# Altium footprint library Amin-Library.PcbLib: 601 footprints (part 36 of 38)
Each footprint in its own frame and in the unit in brackets; x right, y up, seen from the top. Pads: shape width x height; smd on the part's side, far side on the other; paste and mask are expansions set on the pad; w line width, h text height; cw(c..) or ccw(c..) is an arc to the next point about the centre after c.
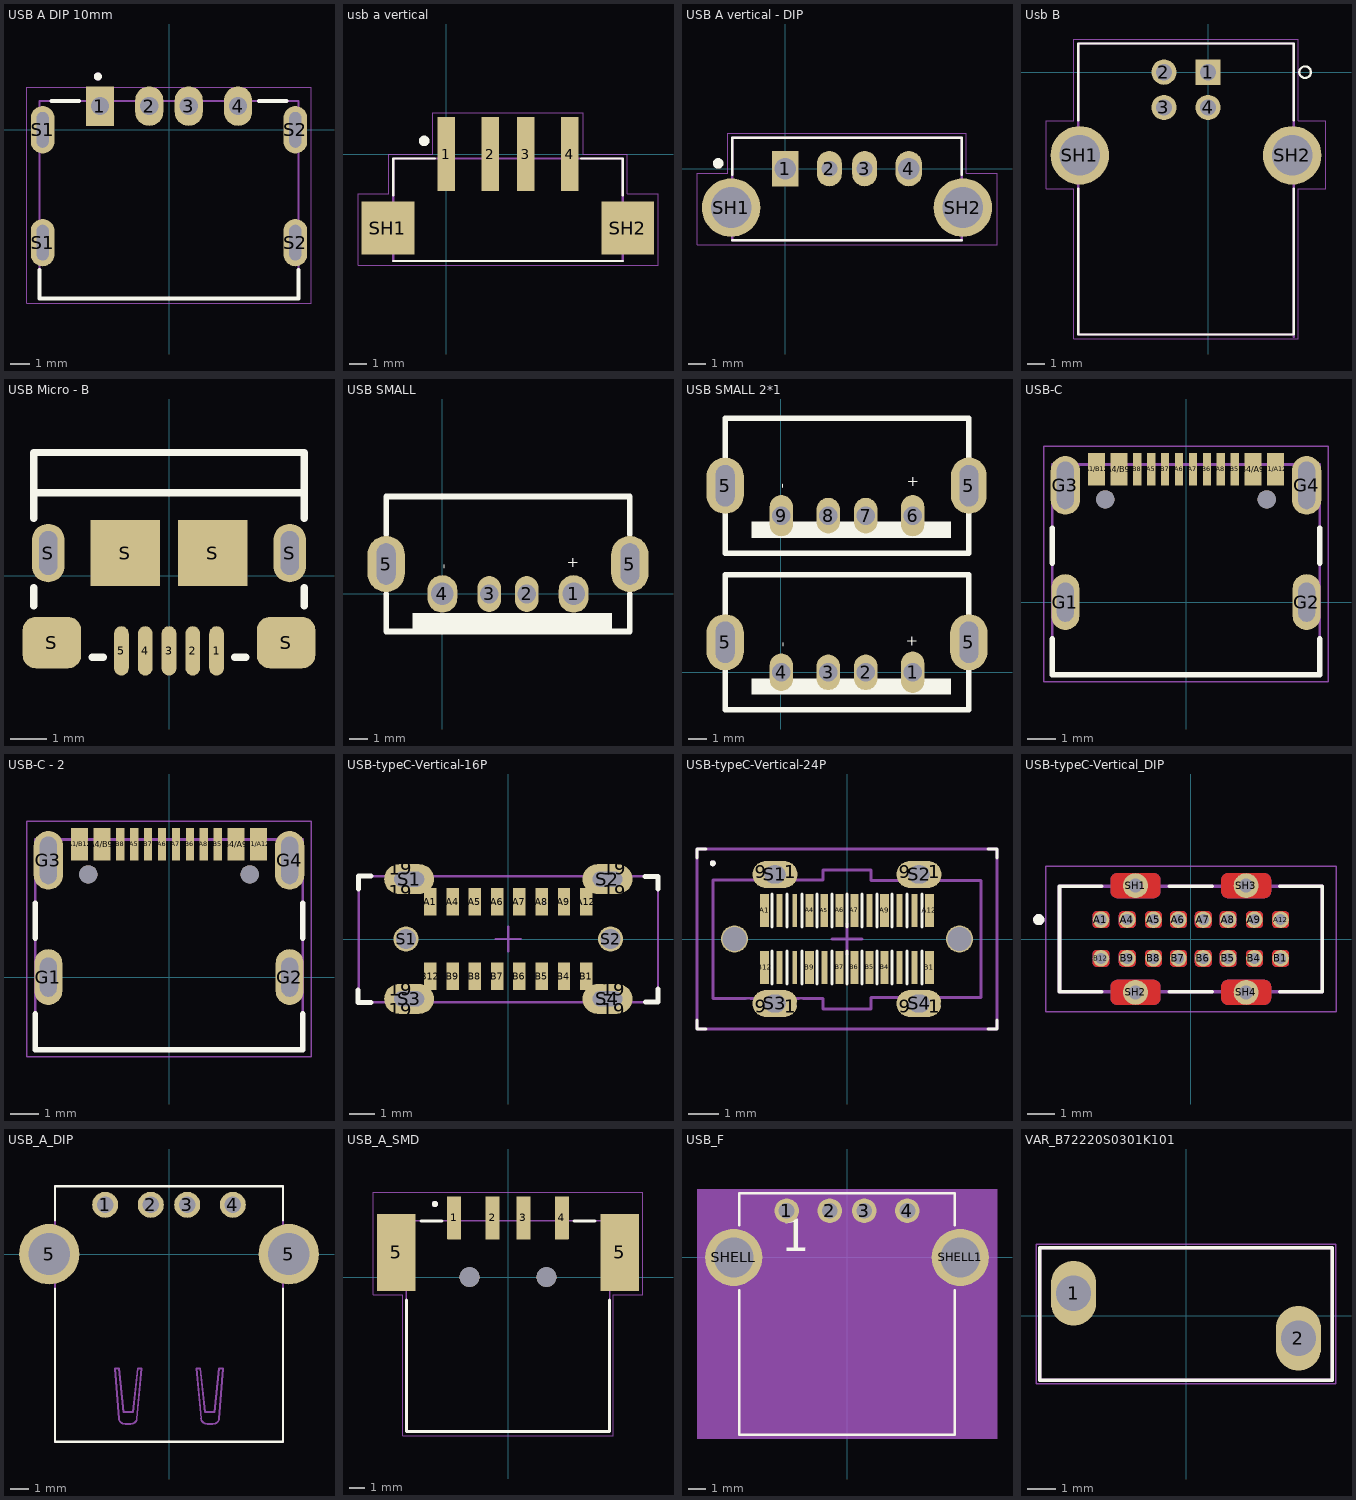
[diagram p35: the footprints below, top view; thin cyan lines are the x and y axes]

## USB A DIP 10mm [mm]
height 6.63
pads (8):
  rect 1.428x2 hole 0.92: 1(-3.5,1.2)
  oval 1.428x2 hole 0.92: 2(-1,1.2) 3(1,1.2) 4(3.5,1.2)
  oval 1.2x2.4 hole 0.6 slot 1.8 at 90 deg: S1(-6.4,-5.715) S1(-6.4,0) S2(6.4,-5.715) S2(6.4,0)
Top Overlay:
  circle w0.2: c-3.6,2.7 r0.1
  lines w0.2: -6.55,-7.112 -6.55,-8.55 6.55,-8.55 6.55,-7.112 ; -5.95,1.45 -4.55,1.45 ; 4.55,1.45 5.95,1.45
Mechanical 13:
  circle w0.2: c-3.6,2.7 r0.1
  lines w0.1: -6.55,-8.55 -6.55,1.45 6.55,1.45 6.55,-8.55 -6.55,-8.55
Mechanical 15:
  lines w0.05: -7.205,-8.8 -7.205,2.165 7.205,2.165 7.205,-8.8 -7.205,-8.8
3D body "usb1125-gf-b.stp": height 5.86, standoff -3.15, extent -6.55,-8.646 6.55,1.354

## usb a vertical [mm]
pads (6):
  rect 1x4.2 smd: 1(0,0) 2(2.5,0) 3(4.5,0) 4(7,0)
  rect 3x3 smd: SH1(-3.302,-4.191) SH2(10.287,-4.191)
Top Overlay:
  circle w0.3: c-1.25,0.75 r0.15
  lines w0.127: -3,-6.05 10,-6.05 ; -3,-2.35 -3,-0.25 -0.65,-0.25 ; 7.65,-0.25 10,-0.25 10,-2.35
Mechanical 13:
  circle w0.3: c0,0.75 r0.15
  lines w0.127: -3,-6.05 -3,-0.25 10,-0.25 10,-6.05 -3,-6.05
Mechanical 15:
  lines w0.05: -5,-6.3 -5,-2.25 -3.25,-2.25 -3.25,0 -0.75,0 -0.75,2.35 7.75,2.35 7.75,0 10.25,0 10.25,-2.25 12,-2.25 12,-6.3 -5,-6.3
3D body "uj2-av-4-smt.stp": height 14.96, standoff -1.97, extent -3.644,-6.858 10.756,1.042

## USB A vertical - DIP [mm]
pads (6):
  rect 1.5x2 hole 1.2: 1(0,0)
  oval 1.408x2 hole 0.9: 2(2.5,0) 3(4.5,0)
  oval 1.5x2 hole 1.2: 4(7,0)
  round 3.316 hole 2.3: SH1(-3.07,-2.2) SH2(10.07,-2.2)
Top Overlay:
  circle w0.3: c-3.8,0.3 r0.15
  lines w0.127: -3,-4.05 10,-4.05 ; -3,-0.35 -3,1.75 10,1.75 10,-0.35
Mechanical 13:
  circle w0.3: c0,0.05 r0.15
  lines w0.127: -3,-4.05 -3,1.75 10,1.75 10,-4.05 -3,-4.05
Mechanical 15:
  lines w0.05: -5,-4.3 -5,-0.25 -3.25,-0.25 -3.25,2 10.25,2 10.25,-0.25 12,-0.25 12,-4.3 -5,-4.3
3D body "CUI_DEVICES_UJ2-AV-1-TH.step": height 14.96, standoff -2.99, extent -3.944,-4.826 11.056,2.674

## Usb B [mm]
pads (6):
  rect 1.428x1.428 hole 0.92: 1(0,0)
  round 1.428 hole 0.92: 2(-2.5,0) 3(-2.5,-2) 4(0,-2)
  round 3.316 hole 2.3: SH1(-7.27,-4.71) SH2(4.77,-4.71)
Top Overlay:
  circle w0.127: c5.5,0 r0.329
  lines w0.127: -7.35,-6.61 -7.35,-14.87 4.85,-14.87 4.85,-6.61 ; -7.35,-2.74 -7.35,1.63 4.85,1.63 4.85,-2.74
Mechanical 4:
  circle w0.4: c0,0 r0.2
  circle w0.4: c0,0 r0.2
  lines w0.127: -7.35,-14.87 4.85,-14.87 ; -7.35,-14.87 -7.35,1.63 ; -7.35,-14.87 4.85,-14.87 ; -7.35,-14.87 -7.35,1.63 ; -7.35,1.63 4.85,1.63 ; -7.35,1.63 4.85,1.63 ; 4.85,-14.87 4.85,1.63 ; 4.85,-14.87 4.85,-14.99 4.85,-14.87 ; 4.85,-14.87 4.85,1.63
  text "PCB EDGE" at -7.493,-14.224 h1.88
Mechanical 16:
  lines w0.05: -9.17,-6.61 -7.6,-6.61 -7.6,-15.12 5.1,-15.12 5.1,-6.62 6.67,-6.62 6.67,-2.74 5.1,-2.74 5.1,1.88 -7.6,1.88 -7.6,-2.74 -9.17,-2.74 -9.17,-6.61
3D body "User Library-Receptacle-1.step": height 10.71, standoff -3.79, extent -8.615,-14.732 6.075,1.468

## USB Micro - B [mm]
pads (11):
  oval 0.4x1.35 smd: 1(1.299,-2.054) 2(0.649,-2.054) 3(-0.001,-2.054) 4(-0.651,-2.054) 5(-1.301,-2.054)
  oval 0.9x1.6 hole 0.5 slot 1.2 at 90 deg: S(-3.301,0.621) S(3.299,0.621)
  rrect50% 1.6x1.4 smd: S(-3.201,-1.829) S(3.199,-1.829)
  rect 1.9x1.8 smd: S(-1.201,0.621) S(1.199,0.621)
Top Overlay:
  lines w0.2: -3.701,-0.829 -3.701,-0.329 ; -3.701,1.571 -3.701,2.271 ; -2.101,-2.229 -1.801,-2.229 ; 1.799,-2.229 2.099,-2.229 ; 3.699,-0.829 3.699,-0.329 ; 3.699,1.571 3.699,2.271 ; -3.701,2.271 -3.701,3.371 3.699,3.371 3.699,2.271 ; -3.701,2.271 3.699,2.271

## USB SMALL [mm]
pads (6):
  oval 1.6x2 hole 1.2: 1(7,0) 4(0,0)
  oval 1.25x1.905 hole 1: 2(4.5,0) 3(2.5,0)
  oval 2x3 hole 1 slot 2.2 at 90 deg: 5(-3,1.599) 5(10,1.599)
Top Overlay:
  rectangle: -1.584,-2.001 9.038,-1.016
  lines w0.3: -3,0 -3,-2.001 10,-2.001 10,0 ; -3,3.175 -3,5.199 10,5.199 10,3.175
  text "-" at 0.525,1.325 h1
  text "+" at 6.625,1.2 h1
3D body "614004185023.stp": height 10.01, standoff -2.99, extent -3.594,-2.286 10.706,5.114

## USB SMALL 2*1 [mm]
pads (12):
  oval 1.25x2.2 hole 1: 1(7.04,0) 6(7.04,8.35) 9(0.04,8.35)
  oval 1.25x1.905 hole 1: 2(4.54,0) 3(2.54,0) 7(4.54,8.35) 8(2.54,8.35)
  oval 1.25x2 hole 1: 4(0.04,0)
  oval 2x3 hole 1 slot 2.2 at 90 deg: 5(-2.96,1.599) 5(-2.96,9.95) 5(10.04,1.599)
  oval 1.905x3 hole 1 slot 2.2 at 90 deg: 5(10.04,9.95)
Top Overlay:
  rectangle: -1.544,7.156 9.078,8.03
  rectangle: -1.544,-1.194 9.078,-0.32
  lines w0.3: -2.96,-2.001 10.04,-2.001 10.04,5.199 -2.96,5.199 -2.96,-2.001 ; -2.96,6.349 10.04,6.349 10.04,13.55 -2.96,13.55 -2.96,6.349
  text "-" at 0.54,9.775 h1
  text "+" at 6.715,9.7 h1
  text "-" at 0.565,1.325 h1
  text "+" at 6.665,1.2 h1
3D body "614004185023.stp": height 10.01, standoff -2.99, extent -3.594,-2.101 10.706,5.3
3D body "614004185023.stp": height 10.01, standoff -2.99, extent -3.594,6.249 10.706,13.65

## USB-C [mm]
pads (18):
  rect 0.6x1.15 smd: A1/B12(-3.2,4.755) A4/B9(-2.4,4.755) B1/A12(3.2,4.755) B4/A9(2.4,4.755)
  rect 0.3x1.15 smd: A5(-1.25,4.755) A6(-0.25,4.755) A7(0.25,4.755) A8(1.25,4.755) B5(1.75,4.755) B6(0.75,4.755) B7(-0.75,4.755) B8(-1.75,4.755)
  oval 1x2 hole 0.6 slot 1.4 at 90 deg: G1(-4.32,0) G2(4.32,0)
  oval 1.05x2.1 hole 0.6 slot 1.7 at 90 deg: G3(-4.32,4.18) G4(4.32,4.18)
  round 0.65 hole 0.65 unplated: ""(-2.89,3.68) ""(2.89,3.68)
Top Overlay:
  lines w0.2: -4.79,-1.32 -4.79,-2.6 4.79,-2.6 4.79,-1.32 ; -4.79,1.4 -4.79,2.65 ; 4.79,1.4 4.79,2.65
Mechanical 13:
  lines w0.1: -4.79,-2.6 4.79,-2.6 4.79,4.93 -4.79,4.93 -4.79,-2.6
Mechanical 15:
  lines w0.05: -5.1,-2.85 -5.1,5.58 5.1,5.58 5.1,-2.85 -5.1,-2.85
3D body "USB4105-GF-A--3DModel-STEP-56544.STEP": height 3.17, standoff -0.99, extent -4.79,-2.6 4.79,5.11

## USB-C - 2 [mm]
pads (18):
  rect 0.6x1.15 smd: A1/B12(-3.2,4.755) A4/B9(-2.4,4.755) B1/A12(3.2,4.755) B4/A9(2.4,4.755)
  rect 0.3x1.15 smd: A5(-1.25,4.755) A6(-0.25,4.755) A7(0.25,4.755) A8(1.25,4.755) B5(1.75,4.755) B6(0.75,4.755) B7(-0.75,4.755) B8(-1.75,4.755)
  oval 1x2 hole 0.6 slot 1.4 at 90 deg: G1(-4.32,0) G2(4.32,0)
  oval 1.05x2.1 hole 0.6 slot 1.7 at 90 deg: G3(-4.32,4.18) G4(4.32,4.18)
  round 0.65 hole 0.65 unplated: ""(-2.89,3.68) ""(2.89,3.68)
Top Overlay:
  lines w0.2: -4.79,-1.32 -4.79,-2.6 4.79,-2.6 4.79,-1.32 ; -4.79,1.4 -4.79,2.65 ; 4.79,1.4 4.79,2.65
Mechanical 13:
  lines w0.1: -4.79,-2.6 -4.79,4.93 4.79,4.93 4.79,-2.6 -4.79,-2.6
Mechanical 15:
  lines w0.05: -5.1,-2.85 5.1,-2.85 5.1,5.58 -5.1,5.58 -5.1,-2.85
3D body "USB4105-GF-A--3DModel-STEP-56544.STEP": height 3.17, standoff -0.99, extent -4.79,-2.6 4.79,5.11

## USB-typeC-Vertical-16P [mm]
pads (30):
  rect 1.2x1 on Top Paste: 19(-4.318,-2.826) 19(-4.318,-2.019) 19(-4.318,1.892) 19(-4.318,2.826) 19(4.225,-2.826) 19(4.225,-2.019) 19(4.259,1.892) 19(4.259,2.826)
  rect 0.5x1.1 smd paste-1 mask+0: A1(-3.125,1.5) A4(-2.232,1.5) A5(-1.339,1.5) A6(-0.446,1.5) A7(0.446,1.5) A8(1.339,1.5) A9(2.232,1.5) A12(3.125,1.5) B1(3.125,-1.5) B4(2.232,-1.5) B5(1.339,-1.5) B6(0.446,-1.5) B7(-0.446,-1.5) B8(-1.339,-1.5) B9(-2.232,-1.5) B12(-3.125,-1.5)
  round 1 hole 0.8: S1(-4.1,0) S2(4.1,0)
  oval 2x1.2 hole 0.6 slot 1.2 at 0 deg mask+0.05: S1(-3.975,2.4) S2(3.975,2.4) S3(-3.975,-2.4) S4(3.975,-2.4)
Top Overlay:
  lines w0.2: -6.024,-2.539 -6.024,-2.039 ; -6,-2.539 -5.5,-2.539 ; -6,2 -6,2.5 ; -6,2.524 -5.5,2.524 ; 5.475,2.508 5.975,2.508 ; 5.5,-2.524 6,-2.524 ; 6,-2.5 6,-2 ; 5.999,2.008 5.999,2.508
Top Paste:
  rectangle: 2.989,0.95 3.289,2.05
  rectangle: 2.075,0.95 2.375,2.05
  rectangle: 1.186,0.95 1.486,2.05
  rectangle: -3.261,0.95 -2.961,2.05
  rectangle: -2.372,0.95 -2.072,2.05
  rectangle: -1.482,0.95 -1.182,2.05
  rectangle: -0.593,0.95 -0.293,2.05
  rectangle: 0.296,0.95 0.596,2.05
  rectangle: 2.975,-2.05 3.275,-0.95
  rectangle: 2.061,-2.05 2.361,-0.95
  rectangle: 1.171,-2.05 1.471,-0.95
  rectangle: -3.275,-2.05 -2.975,-0.95
  rectangle: -2.386,-2.05 -2.086,-0.95
  rectangle: -1.497,-2.05 -1.197,-0.95
  rectangle: -0.607,-2.05 -0.307,-0.95
  rectangle: 0.282,-2.05 0.582,-0.95
Mechanical 13:
  lines w0.1: -6,-2.539 -0.927,-2.539 0.96,-2.539 0.961,-2.54 1.015,-2.54 6,-2.54 6,2.524 3.901,2.524 0.8,2.524 -0.8,2.524 -6,2.524 -6,-2.539
Mechanical 15:
  lines w0.1: -0.5,0 0.5,0 ; 0,-0.5 0,0.5 ; -6,-2.539 -6,2.524 6,2.524 6,-2.539 -6,-2.539
3D body "XB-USB-C-1638.stp": height 10, standoff -1.8, extent -6,-2.5 6,2.5

## USB-typeC-Vertical-24P [mm]
pads (38):
  rect 1x1.2 on Top Paste: 19(-3.063,-2.241) 19(-3.063,2.241) 19(-1.684,-2.241) 19(-1.684,2.241) 19(1.737,-2.241) 19(1.737,2.241) 19(3.116,-2.241) 19(3.116,2.241)
  rect 0.3x1.1 smd mask+0.03: A1(-2.75,0.95) A9(1.25,0.95) A12(2.75,0.95) B1(2.75,-0.95) B9(-1.25,-0.95) B12(-2.75,-0.95)
  rect 0.2x1.1 smd paste-1 mask+0.03: A2(-2.25,0.95) A8(0.75,0.95) A10(1.75,0.95) A11(2.25,0.95) B2(2.25,-0.95) B3(1.75,-0.95) B8(-0.75,-0.95) B11(-2.25,-0.95)
  rect 0.15x1.1 smd paste-1 mask+0.03: A3(-1.75,0.95) B10(-1.75,-0.95)
  rect 0.28x1.1 smd mask+0.03: A4(-1.25,0.95) A6(-0.25,0.95) A7(0.25,0.95) B4(1.25,-0.95) B5(0.75,-0.95) B6(0.25,-0.95) B7(-0.25,-0.95)
  rect 0.25x1.1 smd mask+0.03: A5(-0.75,0.95)
  oval 1.5x0.9 hole 0.6 slot 0.7 at 0 deg mask+0.05: S1(-2.4,2.15) S2(2.4,2.15) S3(-2.4,-2.15) S4(2.4,-2.15)
  round 0.9 hole 0.8: ""(-3.75,0) ""(3.75,0)
Top Overlay:
  circle w0.1: c-4.474,2.524 r0.05
  lines w0.1: -5,2.7 -5,3 -4.7,3 ; -4.996,-2.698 -4.996,-2.998 -4.696,-2.998 ; -2.5,-1.5 -2.5,-0.4 ; -2.5,0.4 -2.5,1.5 ; -2,-1.5 -2,-0.4 ; -2,0.4 -2,1.5 ; -1.5,-1.5 -1.5,-0.4 ; -1.5,0.4 -1.5,1.5 ; -1,-1.5 -1,-0.4 ; -1,0.4 -1,1.5 ; -0.5,-1.5 -0.5,-0.4 ; -0.5,0.4 -0.5,1.5 ; 0,-1.5 0,-0.4 ; 0,0.4 0,1.5 ; 0.5,-1.5 0.5,-0.4 ; 0.5,0.4 0.5,1.5 ; 1,-1.5 1,-0.4 ; 1,0.4 1,1.5 ; 1.5,-1.5 1.5,-0.4 ; 1.5,0.4 1.5,1.5 ; 2,-1.5 2,-0.4 ; 2,0.4 2,1.5 ; 2.5,-1.5 2.5,-0.4 ; 2.5,0.4 2.5,1.5 ; 4.696,2.998 4.996,2.998 4.996,2.698 ; 4.698,-2.996 4.998,-2.996 4.998,-2.696
Mechanical 13:
  circle w0.1: c-4.474,2.524 r0.05
  circle w0.1: c3.75,0 r0.33
  circle w0.1: c-3.75,0 r0.33
  lines w0.1: -4.475,-1.975 -4.475,-1.6 -4.475,1.975 -0.8,1.975 -0.8,2.3 0.8,2.3 0.8,1.95 4.475,1.95 4.475,1.675 4.475,-1.95 0.8,-1.95 0.8,-2.325 -0.8,-2.325 -0.8,-1.975 -4.475,-1.975
Mechanical 15:
  lines w0.1: -0.5,0 0.5,0 ; 0,-0.5 0,0.5 ; -5,-3 5,-3 5,3 -5,3 -5,-3
3D body "USB-typeC-Vertical.stp": height 9.06, standoff -2.49, extent -4.47,-2.3 4.47,2.3

## USB-typeC-Vertical_DIP [mm] "CUI_UJ20-C-V-C-2-SMT-TR"
height 10.5
pads (20):
  round 0.6 hole 0.4 mask+0: A1(-3.25,0.7) A4(-2.3,0.7) A5(-1.35,0.7) A6(-0.45,0.7) A7(0.45,0.7) A8(1.35,0.7) A9(2.3,0.7) A12(3.25,0.7) B1(3.25,-0.7) B4(2.3,-0.7) B5(1.35,-0.7) B6(0.45,-0.7) B7(-0.45,-0.7) B8(-1.35,-0.7) B9(-2.3,-0.7) B12(-3.25,-0.7)
  round 0.9 hole 0.5 mask+0: SH1(-2,1.93) SH2(-2,-1.93) SH3(2,1.93) SH4(2,-1.93)
Top Layer:
  drawing of 20 lines, arcs and shapes, not listed
Bottom Layer:
  drawing of 20 lines, arcs and shapes, not listed
Top Overlay:
  circle w0.2: c-5.5,0.7 r0.1
  lines w0.127: -3.22,-1.9 -4.75,-1.9 -4.75,1.9 -3.22,1.9 ; -0.78,-1.9 0.78,-1.9 ; -0.78,1.9 0.78,1.9 ; 3.22,-1.9 4.75,-1.9 4.75,1.9 3.22,1.9
Top Solder:
  drawing of 20 lines, arcs and shapes, not listed
Bottom Solder:
  drawing of 20 lines, arcs and shapes, not listed
Mechanical 1:
  drawing of 160 lines, arcs and shapes, not listed
Mechanical 13:
  circle w0.2: c-5.5,0.7 r0.1
  lines w0.127: -4.75,-1.9 4.75,-1.9 4.75,1.9 -4.75,1.9 -4.75,-1.9
Mechanical 15:
  lines w0.05: -5.25,-2.63 5.25,-2.63 5.25,2.63 -5.25,2.63 -5.25,-2.63

## USB_A_DIP [mm]
pads (6):
  round 1.428 hole 0.92: 1(-3.5,2.71) 2(-1,2.71) 3(1,2.71) 4(3.5,2.71)
  round 3.316 hole 2.3: 5(-6.57,0) 5(6.57,0)
Top Overlay:
  lines w0.127: -6.25,-1.88 -6.25,-10.28 6.25,-10.28 6.25,-1.88 ; -6.25,1.87 -6.25,3.72 6.25,3.72 6.25,1.87
Mechanical 4:
  lines w0.102: -2.959,-6.267 -2.751,-6.267 ; -2.959,-6.267 -2.751,-9.019 -2.959,-6.267 ; -2.959,-6.267 -2.751,-6.267 ; -2.751,-6.267 -2.492,-8.655 ; -2.751,-6.267 -2.492,-8.655 ; -2.492,-8.655 -1.973,-8.655 ; -2.492,-8.655 -1.973,-8.655 ; -1.973,-8.655 -1.713,-6.267 ; -1.973,-8.655 -1.713,-6.267 ; -1.713,-6.267 -1.506,-6.267 ; -1.713,-6.267 -1.506,-6.267 ; -1.506,-6.267 -1.765,-9.019 -1.506,-6.267 ; 1.505,-6.267 1.713,-6.267 ; 1.505,-6.267 1.765,-9.019 1.505,-6.267 ; 1.505,-6.267 1.713,-6.267 ; 1.713,-6.267 1.973,-8.655 ; 1.713,-6.267 1.973,-8.655 ; 1.973,-8.655 2.492,-8.655 ; 1.973,-8.655 2.492,-8.655 ; 2.492,-8.655 2.751,-6.267 ; 2.492,-8.655 2.751,-6.267 ; 2.751,-6.267 2.959,-6.267 ; 2.751,-6.267 2.959,-6.267 ; 2.959,-6.267 2.751,-9.019 2.959,-6.267 ; -2.752,-9.017 ccw(c-2.458,-8.996) -2.544,-9.278 cw(c-2.458,-8.996) -2.752,-9.017 ; -2.543,-9.278 ccw(c-2.258,-8.347) -1.974,-9.278 cw(c-2.258,-8.347) -2.543,-9.278 ; -1.973,-9.278 ccw(c-2.059,-8.996) -1.765,-9.017 cw(c-2.059,-8.996) -1.973,-9.278 ; 1.765,-9.017 ccw(c2.059,-8.996) 1.973,-9.278 cw(c2.059,-8.996) 1.765,-9.017 ; 1.973,-9.278 ccw(c2.258,-8.347) 2.543,-9.278 cw(c2.258,-8.347) 1.973,-9.278 ; 2.543,-9.278 ccw(c2.457,-8.996) 2.751,-9.017 cw(c2.457,-8.996) 2.543,-9.278
  lines w0.127: -6.25,-10.28 -6.25,3.72 -6.25,-10.28 ; 6.25,-10.28 6.25,3.72 6.25,-10.28
3D body "2310212_292303-4.stp": height 7.29, standoff -3.99, extent -8.233,-10.429 8.001,3.571

## USB_A_SMD [mm]
pads (8):
  rrect4% 0.9x2.8 smd: 1(-3.5,3.85) 2(-1,3.85) 3(1,3.85) 4(3.5,3.85)
  rect 2.5x5 smd: 5(-7.25,1.6) 5(7.25,1.6)
  round 1.3 hole 1.3 unplated: ""(-2.5,0) ""(2.5,0)
Top Overlay:
  circle w0.2: c-4.75,4.75 r0.1
  lines w0.2: -6.6,-1.5 -6.6,-10.05 6.6,-10.05 6.6,-1.5 ; -5.65,3.65 -4.3,3.65 ; 4.3,3.65 5.65,3.65
Mechanical 13:
  circle w0.2: c-4.75,4.75 r0.1
  lines w0.1: -6.6,-10.05 -6.6,3.65 6.6,3.65 6.6,-10.05 -6.6,-10.05
  text "PCB EDGE" at -3.5,-9.5 h1.02
Mechanical 15:
  lines w0.05: -8.75,-1.15 -8.75,5.5 8.75,5.5 8.75,-1.15 6.85,-1.15 6.85,-10.3 -6.85,-10.3 -6.85,-1.15 -8.75,-1.15
3D body "USB-A-S-F-B-SM2-R-TR--3DModel-STEP-56544.STEP": height 7.8, standoff -1.09, extent -8.2,-10.167 8.2,4.833

## USB_F [mm]
pads (6):
  round 1.428 hole 0.92: 1(-3.5,2.71) 2(-1,2.71) 3(1,2.71) 4(3.5,2.71)
  round 3.316 hole 2.3: SHELL(-6.57,0) SHELL1(6.57,0)
Top Overlay:
  lines w0.127: -6.25,-1.88 -6.25,-10.28 6.25,-10.28 6.25,-1.88 ; -6.25,1.87 -6.25,3.72 6.25,3.72 6.25,1.87
  text "1" at -3.8,0.35 h1.88
Mechanical 4:
  lines w0.102: -2.959,-6.267 -2.751,-9.019 -2.959,-6.267 ; -2.959,-6.267 -2.751,-6.267 ; -2.959,-6.267 -2.751,-6.267 ; -2.751,-6.267 -2.492,-8.655 ; -2.751,-6.267 -2.492,-8.655 ; -2.492,-8.655 -1.973,-8.655 ; -2.492,-8.655 -1.973,-8.655 ; -1.973,-8.655 -1.713,-6.267 ; -1.973,-8.655 -1.713,-6.267 ; -1.713,-6.267 -1.506,-6.267 ; -1.713,-6.267 -1.506,-6.267 ; -1.506,-6.267 -1.765,-9.019 -1.506,-6.267 ; 1.505,-6.267 1.765,-9.019 1.505,-6.267 ; 1.505,-6.267 1.713,-6.267 ; 1.505,-6.267 1.713,-6.267 ; 1.713,-6.267 1.973,-8.655 ; 1.713,-6.267 1.973,-8.655 ; 1.973,-8.655 2.492,-8.655 ; 1.973,-8.655 2.492,-8.655 ; 2.492,-8.655 2.751,-6.267 ; 2.492,-8.655 2.751,-6.267 ; 2.751,-6.267 2.959,-6.267 ; 2.751,-6.267 2.959,-6.267 ; 2.959,-6.267 2.751,-9.019 2.959,-6.267 ; -2.752,-9.017 ccw(c-2.458,-8.996) -2.544,-9.278 cw(c-2.458,-8.996) -2.752,-9.017 ; -2.543,-9.278 ccw(c-2.258,-8.347) -1.974,-9.278 cw(c-2.258,-8.347) -2.543,-9.278 ; -1.973,-9.278 ccw(c-2.059,-8.996) -1.765,-9.017 cw(c-2.059,-8.996) -1.973,-9.278 ; 1.765,-9.017 ccw(c2.059,-8.996) 1.973,-9.278 cw(c2.059,-8.996) 1.765,-9.017 ; 1.973,-9.278 ccw(c2.258,-8.347) 2.543,-9.278 cw(c2.258,-8.347) 1.973,-9.278 ; 2.543,-9.278 ccw(c2.457,-8.996) 2.751,-9.017 cw(c2.457,-8.996) 2.543,-9.278
  lines w0.127: -6.25,-10.28 -6.25,3.72 -6.25,-10.28 ; 6.25,-10.28 6.25,3.72 6.25,-10.28
  text "1" at -3.8,0.35 h1.88
  text "4" at 3.1,0.45 h1.88
  text "1" at -3.8,0.35 h1.88
  text "4" at 3.1,0.45 h1.88
Mechanical 16:
  region: -8.7,3.97 8.7,3.97 8.7,-10.53 -8.7,-10.53
3D body "2310212_292303-4.stp": height 7.29, standoff -3.99, extent -8.233,-10.429 8.001,3.571

## VAR_B72220S0301K101 [mm]
pads (2):
  oval 1.6x2.3 hole 1.25: 1(-4,0.8) 2(4,-0.8)
Top Overlay:
  lines w0.127: -5.207,-2.286 5.207,-2.286 5.207,2.413 -5.207,2.413 -5.207,-2.286
Mechanical 13:
  lines w0.127: -5.207,-2.286 -5.207,2.413 5.207,2.413 5.207,-2.286 -5.207,-2.286
Mechanical 15:
  lines w0.05: -5.334,-2.413 -5.334,2.54 5.334,2.54 5.334,-2.413 -5.334,-2.413
3D body "MOV-10D511K.STEP": height 15.5, standoff -17, extent -6.123,-2 6.377,2